# Altium footprint library R_39K7.PcbLib: 4 footprints
Each footprint in its own frame and in the unit in brackets; x right, y up, seen from the top. Pads: shape width x height; smd on the part's side, far side on the other; paste and mask are expansions set on the pad; w line width, h text height; cw(c..) or ccw(c..) is an arc to the next point about the centre after c.
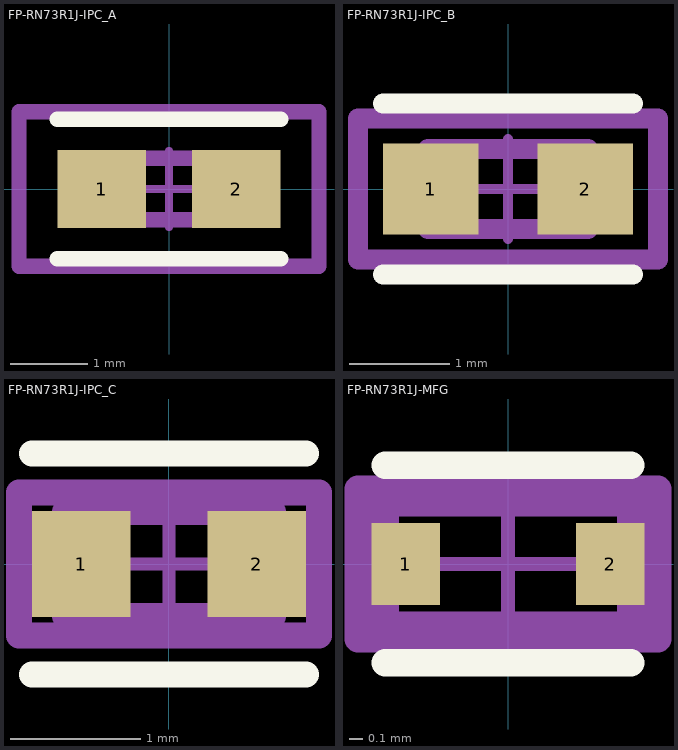
[diagram p0: the footprints below, top view; thin cyan lines are the x and y axes]

## FP-RN73R1J-IPC_A [mm]
pads (2):
  rect 1.156x1.012 smd paste+0 mask+0: 1(-0.875,0) 2(0.875,0)
Top Overlay:
  lines w0.2: -1.453,-0.906 1.453,-0.906 ; -1.453,0.906 1.453,0.906
Top Assembly:
  lines w0.2: -1.953,-1.006 1.953,-1.006 1.953,1.006 -1.953,1.006 -1.953,-1.006
  text ".Designator" at 0,0.188 h1
Top 3D Body:
  lines w0.2: -0.8,-0.4 0.8,-0.4 0.8,0.4 -0.8,0.4 -0.8,-0.4
Top Courtyard:
  lines w0.2: -1.953,-1.006 1.953,-1.006 1.953,1.006 -1.953,1.006 -1.953,-1.006
Top Component Center:
  lines w0.1: -0.5,0 0.5,0 ; 0,-0.5 0,0.5
3D body "Res_KOA_Speer_RN73R1JTTD2582B10_eec.STEP": height 0.25, standoff 0, extent -1.953,-1.006 1.953,1.006

## FP-RN73R1J-IPC_B [mm]
pads (2):
  rect 0.956x0.912 smd paste+0 mask+0: 1(-0.775,0) 2(0.775,0)
Top Overlay:
  lines w0.2: -1.253,-0.856 1.253,-0.856 ; -1.253,0.856 1.253,0.856
Top Assembly:
  lines w0.2: -1.503,-0.706 1.503,-0.706 1.503,0.706 -1.503,0.706 -1.503,-0.706
  text ".Designator" at 0,0.188 h1
Top 3D Body:
  lines w0.2: -0.8,-0.4 0.8,-0.4 0.8,0.4 -0.8,0.4 -0.8,-0.4
Top Courtyard:
  lines w0.2: -1.503,-0.706 1.503,-0.706 1.503,0.706 -1.503,0.706 -1.503,-0.706
Top Component Center:
  lines w0.1: -0.5,0 0.5,0 ; 0,-0.5 0,0.5
3D body "Res_KOA_Speer_RN73R1JTTD2582B10_eec.STEP": height 0.25, standoff 0, extent -1.503,-0.706 1.503,0.706

## FP-RN73R1J-IPC_C [mm]
pads (2):
  rect 0.756x0.812 smd paste+0 mask+0: 1(-0.675,0) 2(0.675,0)
Top Overlay:
  lines w0.2: -1.053,-0.85 1.053,-0.85 ; -1.053,0.85 1.053,0.85
Top Assembly:
  lines w0.2: -1.153,-0.55 1.153,-0.55 1.153,0.55 -1.153,0.55 -1.153,-0.55
  text ".Designator" at 0,0.188 h1
Top 3D Body:
  lines w0.2: -0.8,-0.4 0.8,-0.4 0.8,0.4 -0.8,0.4 -0.8,-0.4
Top Courtyard:
  lines w0.2: -1.153,-0.55 1.153,-0.55 1.153,0.55 -1.153,0.55 -1.153,-0.55
Top Component Center:
  lines w0.1: -0.5,0 0.5,0 ; 0,-0.5 0,0.5
3D body "Res_KOA_Speer_RN73R1JTTD2582B10_eec.STEP": height 0.25, standoff 0, extent -1.153,-0.55 1.153,0.55

## FP-RN73R1J-MFG [mm]
pads (2):
  rect 0.5x0.6 smd paste+0 mask+0: 1(-0.75,0) 2(0.75,0)
Top Overlay:
  lines w0.2: -0.9,-0.725 0.9,-0.725 ; -0.9,0.725 0.9,0.725
Top Assembly:
  lines w0.2: -1.1,-0.55 1.1,-0.55 1.1,0.55 -1.1,0.55 -1.1,-0.55
  text ".Designator" at 0,0.188 h1
Top 3D Body:
  lines w0.2: -0.9,-0.45 0.9,-0.45 0.9,0.45 -0.9,0.45 -0.9,-0.45
Top Courtyard:
  lines w0.2: -1.1,-0.55 1.1,-0.55 1.1,0.55 -1.1,0.55 -1.1,-0.55
Top Component Center:
  lines w0.1: -0.5,0 0.5,0 ; 0,-0.5 0,0.5
3D body "Res_KOA_Speer_RN73R1JTTD2582B10_eec.STEP": height 0.25, standoff 0, extent -1.1,-0.55 1.1,0.55